# Altium integrated library VIETTIEN.IntLib: 167 symbols (part 7 of 8)

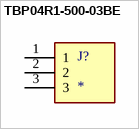
[diagram p138: symbol TBP04R1-500-03BE]

## TBP04R1-500-03BE
designator J?
Terminal Block - Domino - 3 pin; MF: Same Sky; MP: TBP04R1-500-03BE; SnapEDA_Link: https://www.snapeda.com/parts/TBP04R1-500-03BE/Same+Sky/view-part/?ref=snap; Package: None; Value: *; Check_prices: https://www.snapeda.com/parts/TBP04R1-500-03BE/Same+Sky/view-part/?ref=eda
footprint CUI_TBP04R1-500-03BE
pins: 1, 2, 3


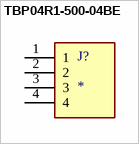
[diagram p139: symbol TBP04R1-500-04BE]

## TBP04R1-500-04BE
designator J?
2~24 Poles, Pluggable, Receptacle, Horizontal, 5.0 Pitch, Terminal Block Connector; MF: Same Sky; MP: TBP04R1-500-04BE; SnapEDA_Link: https://www.snapeda.com/parts/TBP04R1-500-04BE/Same+Sky/view-part/?ref=snap; Package: None; Value: *; Check_prices: https://www.snapeda.com/parts/TBP04R1-500-04BE/Same+Sky/view-part/?ref=eda
footprint CUI_TBP04R1-500-04BE
pins: 1, 2, 3, 4


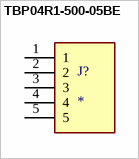
[diagram p140: symbol TBP04R1-500-05BE]

## TBP04R1-500-05BE
designator J?
2~24 Poles, Pluggable, Receptacle, Horizontal, 5.0 Pitch, Terminal Block Connector; MF: Same Sky; MP: TBP04R1-500-05BE; SnapEDA_Link: https://www.snapeda.com/parts/TBP04R1-500-05BE/Same+Sky/view-part/?ref=snap; Package: None; Value: *; Check_prices: https://www.snapeda.com/parts/TBP04R1-500-05BE/Same+Sky/view-part/?ref=eda
footprint CUI_TBP04R1-500-05BE
pins: 1, 2, 3, 4, 5


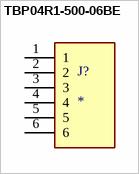
[diagram p141: symbol TBP04R1-500-06BE]

## TBP04R1-500-06BE
designator J?
2~24 Poles, Pluggable, Receptacle, Horizontal, 5.0 Pitch, Terminal Block Connector; MF: Same Sky; MP: TBP04R1-500-06BE; SnapEDA_Link: https://www.snapeda.com/parts/TBP04R1-500-06BE/Same+Sky/view-part/?ref=snap; Package: None; Value: *; Check_prices: https://www.snapeda.com/parts/TBP04R1-500-06BE/Same+Sky/view-part/?ref=eda
footprint CUI_TBP04R1-500-06BE
pins: 1, 2, 3, 4, 5, 6


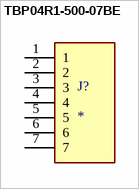
[diagram p142: symbol TBP04R1-500-07BE]

## TBP04R1-500-07BE
designator J?
2~24 Poles, Pluggable, Receptacle, Horizontal, 5.0 Pitch, Terminal Block Connector; MF: Same Sky; MP: TBP04R1-500-07BE; SnapEDA_Link: https://www.snapeda.com/parts/TBP04R1-500-07BE/Same+Sky/view-part/?ref=snap; Package: None; Value: *; Check_prices: https://www.snapeda.com/parts/TBP04R1-500-07BE/Same+Sky/view-part/?ref=eda
footprint CUI_TBP04R1-500-07BE
pins: 1, 2, 3, 4, 5, 6, 7


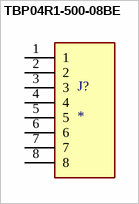
[diagram p143: symbol TBP04R1-500-08BE]

## TBP04R1-500-08BE
designator J?
2~24 Poles, Pluggable, Receptacle, Horizontal, 5.0 Pitch, Terminal Block Connector; MF: Same Sky; MP: TBP04R1-500-08BE; SnapEDA_Link: https://www.snapeda.com/parts/TBP04R1-500-08BE/Same+Sky/view-part/?ref=snap; Package: None; Value: *; Check_prices: https://www.snapeda.com/parts/TBP04R1-500-08BE/Same+Sky/view-part/?ref=eda
footprint CUI_TBP04R1-500-08BE
pins: 1, 2, 3, 4, 5, 6, 7, 8


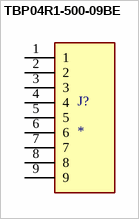
[diagram p144: symbol TBP04R1-500-09BE]

## TBP04R1-500-09BE
designator J?
2~24 Poles, Pluggable, Receptacle, Horizontal, 5.0 Pitch, Terminal Block Connector; MF: Same Sky; MP: TBP04R1-500-09BE; SnapEDA_Link: https://www.snapeda.com/parts/TBP04R1-500-09BE/Same+Sky/view-part/?ref=snap; Package: None; Value: *; Check_prices: https://www.snapeda.com/parts/TBP04R1-500-09BE/Same+Sky/view-part/?ref=eda
footprint CUI_TBP04R1-500-09BE
pins: 1, 2, 3, 4, 5, 6, 7, 8, 9


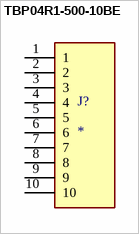
[diagram p145: symbol TBP04R1-500-10BE]

## TBP04R1-500-10BE
designator J?
2~24 Poles, Pluggable, Receptacle, Horizontal, 5.0 Pitch, Terminal Block Connector; MF: Same Sky; MP: TBP04R1-500-10BE; SnapEDA_Link: https://www.snapeda.com/parts/TBP04R1-500-10BE/Same+Sky/view-part/?ref=snap; Package: None; Value: *; Check_prices: https://www.snapeda.com/parts/TBP04R1-500-10BE/Same+Sky/view-part/?ref=eda
footprint CUI_TBP04R1-500-10BE
pins: 1, 2, 3, 4, 5, 6, 7, 8, 9, 10


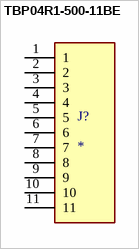
[diagram p146: symbol TBP04R1-500-11BE]

## TBP04R1-500-11BE
designator J?
2~24 Poles, Pluggable, Receptacle, Horizontal, 5.0 Pitch, Terminal Block Connector; MF: Same Sky; MP: TBP04R1-500-11BE; SnapEDA_Link: https://www.snapeda.com/parts/TBP04R1-500-11BE/Same+Sky/view-part/?ref=snap; Package: None; Value: *; Check_prices: https://www.snapeda.com/parts/TBP04R1-500-11BE/Same+Sky/view-part/?ref=eda
footprint CUI_TBP04R1-500-11BE
pins: 1, 2, 3, 4, 5, 6, 7, 8, 9, 10, 11


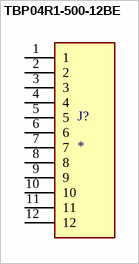
[diagram p147: symbol TBP04R1-500-12BE]

## TBP04R1-500-12BE
designator J?
2~24 Poles, Pluggable, Receptacle, Horizontal, 5.0 Pitch, Terminal Block Connector; MF: Same Sky; MP: TBP04R1-500-12BE; SnapEDA_Link: https://www.snapeda.com/parts/TBP04R1-500-12BE/Same+Sky/view-part/?ref=snap; Package: None; Value: *; Check_prices: https://www.snapeda.com/parts/TBP04R1-500-12BE/Same+Sky/view-part/?ref=eda
footprint CUI_TBP04R1-500-12BE
pins: 1, 2, 3, 4, 5, 6, 7, 8, 9, 10, 11, 12


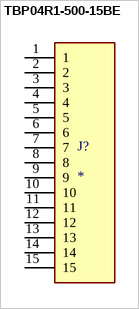
[diagram p148: symbol TBP04R1-500-15BE]

## TBP04R1-500-15BE
designator J?
2~24 Poles, Pluggable, Receptacle, Horizontal, 5.0 Pitch, Terminal Block Connector; MF: Same Sky; MP: TBP04R1-500-15BE; SnapEDA_Link: https://www.snapeda.com/parts/TBP04R1-500-15BE/Same+Sky/view-part/?ref=snap; Package: None; Value: *; Check_prices: https://www.snapeda.com/parts/TBP04R1-500-15BE/Same+Sky/view-part/?ref=eda
footprint CUI_TBP04R1-500-15BE
pins: 1, 2, 3, 4, 5, 6, 7, 8, 9, 10, 11, 12, 13, 14, 15


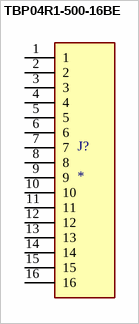
[diagram p149: symbol TBP04R1-500-16BE]

## TBP04R1-500-16BE
designator J?
2~24 Poles, Pluggable, Receptacle, Horizontal, 5.0 Pitch, Terminal Block Connector; MF: Same Sky; MP: TBP04R1-500-16BE; SnapEDA_Link: https://www.snapeda.com/parts/TBP04R1-500-16BE/Same+Sky/view-part/?ref=snap; Package: None; Value: *; Check_prices: https://www.snapeda.com/parts/TBP04R1-500-16BE/Same+Sky/view-part/?ref=eda
footprint CUI_TBP04R1-500-16BE
pins: 1, 2, 3, 4, 5, 6, 7, 8, 9, 10, 11, 12, 13, 14, 15, 16


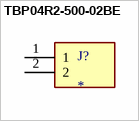
[diagram p150: symbol TBP04R2-500-02BE]

## TBP04R2-500-02BE
designator J?
2~24 Poles, Pluggable, Receptacle, Vertical, 5.0 Pitch, Terminal Block Connector; MF: Same Sky; MP: TBP04R2-500-02BE; SnapEDA_Link: https://www.snapeda.com/parts/TBP04R2-500-02BE/Same+Sky/view-part/?ref=snap; Package: None; Value: *; Check_prices: https://www.snapeda.com/parts/TBP04R2-500-02BE/Same+Sky/view-part/?ref=eda
footprint CUI_TBP04R2-500-02BE
pins: 1, 2


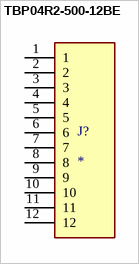
[diagram p151: symbol TBP04R2-500-12BE]

## TBP04R2-500-12BE
designator J?
2~24 Poles, Pluggable, Receptacle, Vertical, 5.0 Pitch, Terminal Block Connector; MF: Same Sky; MP: TBP04R2-500-12BE; SnapEDA_Link: https://www.snapeda.com/parts/TBP04R2-500-12BE/Same+Sky/view-part/?ref=snap; Package: None; Value: *; Check_prices: https://www.snapeda.com/parts/TBP04R2-500-12BE/Same+Sky/view-part/?ref=eda
footprint CUI_TBP04R2-500-12BE
pins: 1, 2, 3, 4, 5, 6, 7, 8, 9, 10, 11, 12


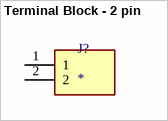
[diagram p152: symbol Terminal Block - 2 pin]

## Terminal Block - 2 pin
designator J?
Terminal Block - Domino - 2 pin; MF: Same Sky; MP: TBP04R1-500-02BE; SnapEDA_Link: https://www.snapeda.com/parts/TBP04R1-500-02BE/Same+Sky/view-part/?ref=snap; Package: None; Value: *; Check_prices: https://www.snapeda.com/parts/TBP04R1-500-02BE/Same+Sky/view-part/?ref=eda
footprint CUI_TBP04R1-500-02BE
pins: 1, 2


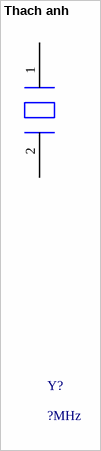
[diagram p153: symbol Thach anh]

## Thach anh
designator Y?, comment ?MHz
Crystal For all Crystal 2pin.
footprint CRY_HC_49_S
pins: 1, 2


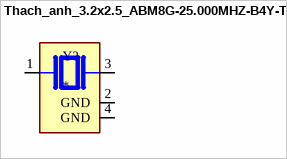
[diagram p154: symbol Thach_anh_3.2x2.5_ABM8G-25.000MHZ-B4Y-T]

## Thach_anh_3.2x2.5_ABM8G-25.000MHZ-B4Y-T
designator Y?
25 MHz Â±30ppm Crystal 10pF 60 Ohms 4-SMD, No Lead / ABM8G-25.000MHZ-B4Y-T; MF: Abracon; Value: *; SnapEDA_Link: https://www.snapeda.com/parts/ABM8G-25.000MHZ-B4Y-T/Abracon+LLC/view-part/?ref=snap; MP: ABM8G-25.000MHZ-B4Y-T; Check_prices: https://www.snapeda.com/parts/ABM8G-25.000MHZ-B4Y-T/Abracon+LLC/view-part/?ref=eda; Availability: In Stock; Price: None; Purchase-URL: https://pricing.snapeda.com/search/part/ABM8G-25.000MHZ-B4Y-T/?ref=eda; Package: SMD-4 Abracon
footprint XTAL_ABM8G-25.000MHZ-B4Y-T
pins: 1, 2 GND (power), 3 2, 4 GND (power)


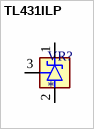
[diagram p155: symbol TL431ILP]

## TL431ILP
designator VR?
MP: TL431ILP; Package: None; Price: None; Value: *; Availability: Unavailable
footprint VREG_TL431ILP
pins: 1 CATHODE, 2 ANODE, 3 REF


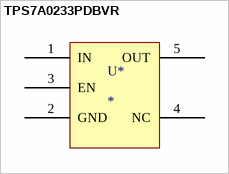
[diagram p156: symbol TPS7A0233PDBVR]

## TPS7A0233PDBVR
designator U*
200mA, nanopower-IQ (25 nA), low-dropout (LDO) voltage regulator with enable
footprint SOT95P280X145-5N
pins: 1 IN, 2 GND, 3 EN, 4 NC, 5 OUT


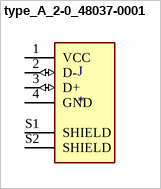
[diagram p157: symbol type_A_2-0_48037-0001]

## type_A_2-0_48037-0001
designator J
USB-A _USB TYPE-A_ USB 2.0 Plug Connector 4 Position Through Hole, Right Angle / 48037-0001; MF: Molex; Package: None; Price: None; SnapEDA_Link: https://www.snapeda.com/parts/48037-0001/Molex/view-part/49135/?ref=snap; Availability: Unavailable; Value: *; MP: 48037-0001
footprint MOLEX_48037-0001
pins: 1 VCC (power), 2 D- (io), 3 D+ (io), 4 GND (power), S1 SHIELD, S2 SHIELD


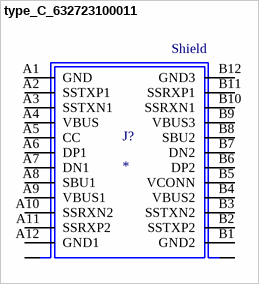
[diagram p158: symbol type_C_632723100011]

## type_C_632723100011
designator J?
632723100011 USB 3.1 Horizontal Receptacle THR/SMT; MF: {'manufacturer': u'Wurth Electronics'}; Package: None; Price: None; Value: *; MP: 632723100011; Availability: Unavailable
footprint 632723100011
pins: A1 GND, A2 SSTXP1, A3 SSTXN1, A4 VBUS, A5 CC, A6 DP1, A7 DN1, A8 SBU1, A9 VBUS1, A10 SSRXN2, A11 SSRXP2, A12 GND1, B1 GND2, B2 SSTXP2, B3 SSTXN2, B4 VBUS2, B5 VCONN, B6 DP2, B7 DN2, B8 SBU2, B9 VBUS3, B10 SSRXN1, B11 SSRXP1, B12 GND3, GND SHIELD, GND1 SHIELD, S1 SHIELD1, S2 SHIELD1, S3 SHIELD1, S4 SHIELD1
text: Shield


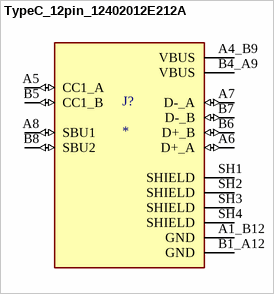
[diagram p159: symbol TypeC_12pin_12402012E212A]

## TypeC_12pin_12402012E212A
designator J?
USB2.0, Type C, Top mount, CH 1.68mm, Dual Row SMT; MP: 12402012E212A; MF: Amphenol ICC (Commercial Products); Price: None; Package: None; Availability: In Stock; SnapEDA_Link: https://www.snapeda.com/parts/12402012E212A/Amphenol/view-part/?ref=snap; Value: *; Check_prices: https://www.snapeda.com/parts/12402012E212A/Amphenol/view-part/?ref=eda; Purchase-URL: https://pricing.snapeda.com/search/part/12402012E212A/?ref=eda
footprint TypeC_12pin_12402012E212A
pins: A1_B12 GND (power), A4_B9 VBUS (power), A5 CC1_A (io), A6 D+_A (io), A7 D-_A (io), A8 SBU1 (io), B1_A12 GND (power), B4_A9 VBUS (power), B5 CC1_B (io), B6 D+_B (io), B7 D-_B (io), B8 SBU2 (io), SH1 SHIELD, SH2 SHIELD, SH3 SHIELD, SH4 SHIELD


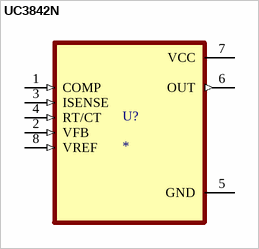
[diagram p160: symbol UC3842N]

## UC3842N
designator U?
Single ended 500KHz current mode PWM controller with 16V/10V UVLO 100% duty cycle, 0C to 70C; MF: Texas Instruments; MP: UC3842N; SnapEDA_Link: https://www.snapeda.com/parts/UC3842N/Texas+Instruments/view-part/?ref=snap; Package: PDIP-8 Texas; Value: *; Check_prices: https://www.snapeda.com/parts/UC3842N/Texas+Instruments/view-part/?ref=eda
footprint DIP794W45P254L959H508Q8
pins: 1 COMP (in), 2 VFB (in), 3 ISENSE (in), 4 RT/CT (in), 5 GND (power), 6 OUT (out), 7 VCC (power), 8 VREF (in)
